# Altium footprint library VISHAY_PKG_DFN1006-2A.PcbLib: 1 footprints
Each footprint in its own frame and in the unit in brackets; x right, y up, seen from the top. Pads: shape width x height; smd on the part's side, far side on the other; paste and mask are expansions set on the pad; w line width, h text height; cw(c..) or ccw(c..) is an arc to the next point about the centre after c.
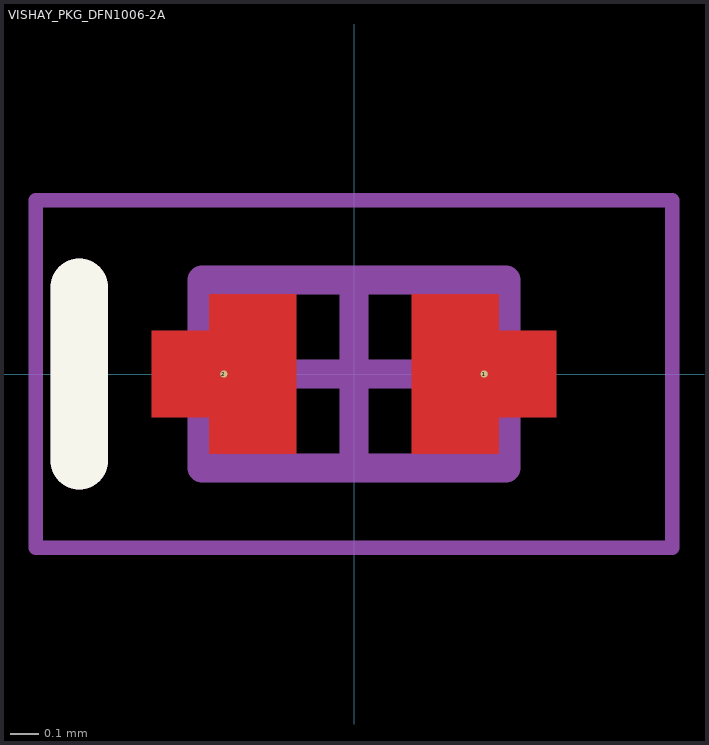
[diagram p0: the footprint, top view; thin cyan lines are the x and y axes]

## VISHAY_PKG_DFN1006-2A [mil]
height 19.68
pads (2):
  round 1 smd: 1(17.72,0) 2(-17.72,0)
Top Layer:
  region: 27.56,-5.91 27.56,5.91 19.68,5.91 19.68,10.83 7.87,10.83 7.87,-10.83 19.68,-10.83 19.68,-5.91
  region: -27.56,-5.91 -27.56,5.91 -19.68,5.91 -19.68,10.83 -7.87,10.83 -7.87,-10.83 -19.68,-10.83 -19.68,-5.91
Top Overlay:
  lines w7.87: -37.4,-11.81 -37.4,11.81
Mechanical 13:
  lines w3.94: -20.67,-12.8 -20.67,12.8 20.67,12.8 20.67,-12.8 -20.67,-12.8
  lines w7.87: -37.4,-11.81 -37.4,11.81
Mechanical 15:
  lines w1.97: -43.31,-23.62 -43.31,23.62 43.31,23.62 43.31,-23.62 -43.31,-23.62
  lines w3.94: -10.83,0 10.83,0 ; 0,-10.83 0,10.83
3D body: height 19.68, standoff 0, extent -20.67,-12.8 20.67,12.8